# Altium schematic symbol library JLC.SchLib: 10 symbols
Pins are listed as number, name and electrical type; pins without a type are passive.

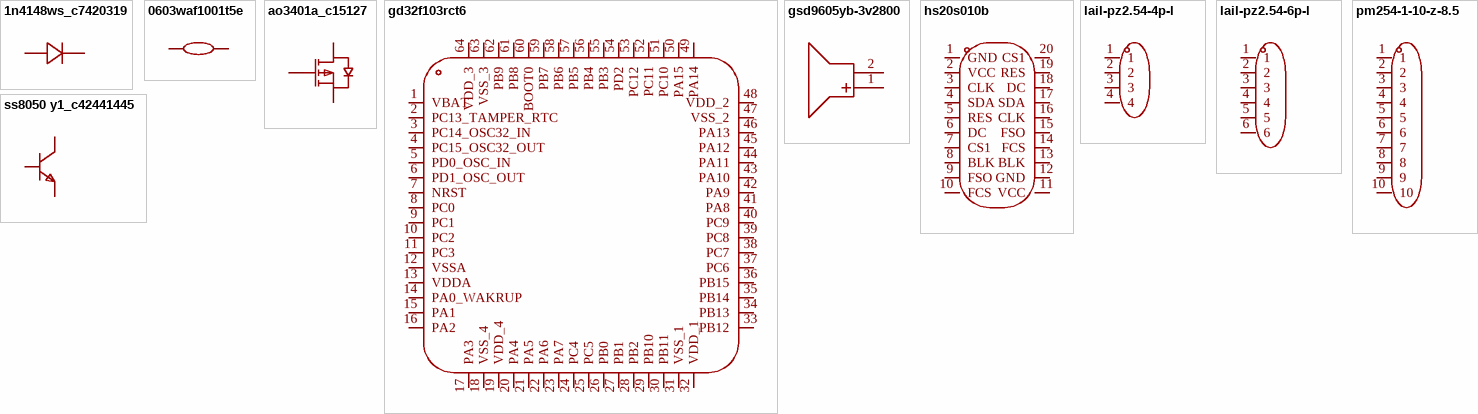
[diagram p0: symbols 1n4148ws_c7420319 to ss8050 y1_c42441445]

## 1n4148ws_c7420319
designator D??  (value not drawn)
二极管配置:独立式;整流电流:150mA;直流反向耐压(Vr):100V;正向压降(Vf):1.25V@150mA;反向恢复时间(Trr):4ns;; Manufacturer: R+O(宏嘉诚); AddInBom: yes; ModelId: 0f2f330c645944df9245ac3c3fec3456; ModelName: SOD-323_L1.7-W1.3-LS2.5-FD; ModelTransform: 98.425,49.2125,0,180,0,0,0,0,0; Diode Configuration: 独立式; Pd - Power Dissipation: 200mW; Current - Rectified: 150mA; Voltage - DC Reverse(Vr): 100V; Non-Repetitive Peak Forward Surge Current: 2A; Reverse Leakage Current (Ir): 1uA@75V; Reverse Recovery Time (trr): 4ns; Operating Junction Temperature Range: -55℃~+150℃; Symbol: 1N4148WS_C7420319; LCSC Part Name: 100V 150mA; SupplierPart: C7420319; ManufacturerPart: 1N4148WS; Supplier Footprint: SOD-323; JLCPCB Part Class: Extended Part; Datasheet: https://item.szlcsc.com/datasheet/1N4148WS/8397141.html; Supplier: LCSC; ConvertToPcb: yes; FootprintName: SOD-323_L1.7-W1.3-LS2.5-FD; Voltage - Forward(Vf@If): 1.25V@150mA
footprint SOD-323_L1.7-W1.3-LS2.5-FD
pins: 1 A, 2 K

## 0603waf1001t5e
designator R??  (value not drawn)
电阻类型:厚膜电阻;阻值:1kΩ;精度:±1%;功率:100mW;工作电压:75V;温度系数:±100ppm/℃;; Manufacturer: UNI-ROYAL(厚声); AddInBom: yes; ModelId: fc143cca1e79419f9cd78b61e9279f08; ModelName: R0603; ModelTransform: 31.8897,63.7794,0,90,0,0,0,0,0; Value: 1kΩ; Tolerance: ±1%; Power(Watts): 100mW; Voltage-Supply(Max): 75V; Symbol: 0603WAF1001T5E; LCSC Part Name: 1kΩ ±1% 100mW 厚膜电阻; SupplierPart: C21190; ManufacturerPart: 0603WAF1001T5E; Supplier Footprint: 0603; JLCPCB Part Class: Basic Part; Datasheet: https://item.szlcsc.com/datasheet/0603WAF1001T5E/21904.html; Supplier: LCSC; ConvertToPcb: yes; FootprintName: R0603; Type: 厚膜电阻; Temperature Coefficient: ±100ppm/℃; Operating Temperature: -55℃~+155℃
footprint R0603
pins: 1, 2

## ao3401a_c15127
designator Q??  (value not drawn)
数量:1个P沟道;漏源电压(Vdss):30V;连续漏极电流(Id):4A;导通电阻(RDS(on)):47mΩ@10V；85mΩ@2.5V；60mΩ@4.5V;耗散功率(Pd):-;阈值电压(Vgs(th)):900mV;; Manufacturer: AOS; AddInBom: yes; ModelId: c62791f0466c4ae2a892c056b845b0ca; ModelName: SOT-23-3P_L2.9-W1.3-H1.0-LS2.4-P0.95; ModelTransform: 98.64468,114.173,0,180,0,0,0.001,-0.002,0; Number: 1个P沟道; Drain to Source Voltage: 30V; Current - Continuous Drain(Id): 4A; Gate Threshold Voltage (Vgs(th)): 900mV; Gate Charge(Qg): 14nC@10V; Input Capacitance(Ciss): 645pF; Reverse Transfer Capacitance (Crss@Vds): 55pF; Output Capacitance(Coss): 80pF; Symbol: AO3401A; LCSC Part Name: 1个P沟道 耐压:30V 电流:4A; SupplierPart: C15127; ManufacturerPart: AO3401A; Supplier Footprint: SOT-23; JLCPCB Part Class: Basic Part; Datasheet: https://item.szlcsc.com/datasheet/AO3401A/15801.html; Supplier: LCSC; ConvertToPcb: yes; FootprintName: SOT-23_L2.9-W1.3-P1.90-LS2.4-BR; RDS(on): 47mΩ@10V；85mΩ@2.5V；60mΩ@4.5V; Pd - Power Dissipation: -; Operating Temperature: -; Type: -
footprint SOT-23_L2.9-W1.3-P1.90-LS2.4-BR
pins: 1 G, 2 S, 3 D

## gd32f103rct6
designator U??  (value not drawn)
CPU内核:ARM Cortex-M3;CPU最大主频:108MHz;CPU位数:32 Bit;; Manufacturer: GigaDevice(兆易创新); AddInBom: yes; ModelId: cd9de06618c44fcf82654c43a457f83c; ModelName: LQFP-64_L10.0-W10.0-H1.4-LS12.0-P0.50; ModelTransform: 472.441,472.441,0,0,0,0,0,0.465,0; CPU Maximum Speed: 108MHz; Core Size: 32 Bit; Program Storage Size: 256KB; Program Memory Type: FLASH; RAM Size: 48KB; Number of I/O: 51; ADC (Bit): 12bit; Oscillator Type: 内置+外置; Voltage - Supply: 2.6V~3.6V; Symbol: GD32F103RCT6; LCSC Part Name: Arm® Cortex®-M3 32-bit MCU; SupplierPart: C80687; ManufacturerPart: GD32F103RCT6; Supplier Footprint: LQFP-64(10x10); JLCPCB Part Class: Extended Part; Datasheet: https://item.szlcsc.com/datasheet/GD32F103RCT6/81837.html; Supplier: LCSC; ConvertToPcb: yes; FootprintName: LQFP-64_L10.0-W10.0-P0.50-LS12.0-BL; CPU Core: ARM Cortex-M3; EEPROM: -; DAC (Bit): 12bit; Operating Temperature: -40℃~+85℃; Features: 日历功能；内置通用定时器；外部管脚复位(NRST)
footprint LQFP-64_L10.0-W10.0-P0.50-LS12.0-BL
pins: 1 VBAT, 2 PC13_TAMPER_RTC, 3 PC14_OSC32_IN, 4 PC15_OSC32_OUT, 5 PD0_OSC_IN, 6 PD1_OSC_OUT, 7 NRST, 8 PC0, 9 PC1, 10 PC2, 11 PC3, 12 VSSA, 13 VDDA, 14 PA0_WAKRUP, 15 PA1, 16 PA2, 17 PA3, 18 VSS_4, 19 VDD_4, 20 PA4, 21 PA5, 22 PA6, 23 PA7, 24 PC4, 25 PC5, 26 PB0, 27 PB1, 28 PB2, 29 PB10, 30 PB11, 31 VSS_1, 32 VDD_1, 33 PB12, 34 PB13, 35 PB14, 36 PB15, 37 PC6, 38 PC7, 39 PC8, 40 PC9, 41 PA8, 42 PA9, 43 PA10, 44 PA11, 45 PA12, 46 PA13, 47 VSS_2, 48 VDD_2, 49 PA14, 50 PA15, 51 PC10, 52 PC11, 53 PC12, 54 PD2, 55 PB3, 56 PB4, 57 PB5, 58 PB6, 59 PB7, 60 BOOT0, 61 PB8, 62 PB9, 63 VSS_3, 64 VDD_3

## gsd9605yb-3v2800
designator BUZZER??  (value not drawn)
驱动方式:有源(内含驱动线路);构造类型:电磁式;额定电压:3.3V;频率:2.7kHz;声压(SPL):80dB;; Manufacturer: INGHAi(赢海); AddInBom: yes; ModelId: d9f071f9511e4f7795b1f85db8085480; ModelName: BUZ-SMD_L9.6-W9.6-H5.0; ModelTransform: 393.7,377.952,0,270,0,0,0,0,0; Voltage Rating: 3.3V; Voltage - Supply: 2V~5V; Value: 2.7kHz; Current Consumption: 30mA; Sound Pressure Level(SPL): 80dB; Symbol: GSD9605YB-3V2800; LCSC Part Name: 9.6*9.6*5mm电磁有源 3V; SupplierPart: C255327; ManufacturerPart: GSD9605YB-3V2800; Supplier Footprint: SMD,9.6x9.6mm; JLCPCB Part Class: Extended Part; Datasheet: https://item.szlcsc.com/datasheet/GSD9605YB-3V2800/249279.html; Supplier: LCSC; ConvertToPcb: yes; FootprintName: BUZ-SMD_GSD9605YB-3V2800; Driver Circuitry: 有源(内含驱动线路); Technology: 电磁式; Diameter(φD): -; Length: 9.6mm; Width: 9.6mm; Height: 5.2mm; Operating Temperature: -20℃~+70℃; Mounting Type: 贴片; Lead Pitch: -; Continuous Operating Time: -
footprint BUZ-SMD_GSD9605YB-3V2800
pins: 1 +, 2 -

## hs20s010b
designator LCD??  (value not drawn)
核心芯片:ST7789;尺寸(inch):2;像素分辨率:320x240;; Manufacturer: HS(汉昇); AddInBom: yes; ModelId: 0121547e629f428887221e14eec3ec9e; ModelName: LCD-TH_HS20S010B; ModelTransform: 1425.194,2488.18384,0,0,0,0,0,0,0; Controller Type: ST7789; Symbol: HS20S010B; LCSC Part Name: 2.0寸240*320(RGB)彩色SPI串口TFT液晶显示屏; SupplierPart: C5329586; ManufacturerPart: HS20S010B; Supplier Footprint: -; JLCPCB Part Class: Extended Part; Datasheet: https://item.szlcsc.com/datasheet/HS20S010B/6087847.html; Supplier: LCSC; ConvertToPcb: yes; FootprintName: LCD-TH_HS20S010B; Size: 2; Dot Pixels: 320x240; Operating Temperature: -20℃~+70℃
footprint LCD-TH_HS20S010B
pins: 1 GND, 2 VCC, 3 CLK, 4 SDA, 5 RES, 6 DC, 7 CS1, 8 BLK, 9 FSO, 10 FCS, 11 VCC, 12 GND, 13 BLK, 14 FCS, 15 FSO, 16 CLK, 17 SDA, 18 DC, 19 RES, 20 CS1

## lail-pz2.54-4p-l
designator H??  (value not drawn)
插针结构:1x4P;间距:2.54mm;圆针/方针:方针;安装方式:直插;排数:单排;总PIN位数:4P;额定电流:3A;额定电压:250V;配合针长度:6mm;塑高:2.5mm;端接针长度:3mm;触头材质:黄铜;触头镀层:金;工作温度:-25℃~+80℃;颜色:黑色;; Manufacturer: LAILAN(莱联); AddInBom: yes; ModelId: 112b012cb4004446aa5386c9c86d05f0; ModelName: CONN-TH_LAIL-PZ2.54-4P-L; ModelTransform: 400.039,100,0,0,0,0,0,0,-118.11; Pin Structure: 1x4P; Pitch: 2.54mm; Circluar Pins/Square Pins: 方针; Current Rating: 3A; Voltage Rating (Max): 250V; LCSC Part Name: 1x4P 间距:2.54mm 方针 直插; SupplierPart: C54950602; ManufacturerPart: LAIL-PZ2.54-4P-L; Supplier Footprint: 插件,P=2.54mm; JLCPCB Part Class: Extended Part; Datasheet: https://item.szlcsc.com/datasheet/LAIL-PZ2.54-4P-L/58519955.html; Supplier: LCSC; ConvertToPcb: yes; SymbolName: LAIL-PZ2.54-4P-L; FootprintName: CONN-TH_LAIL-PZ2.54-4P-L; Mounting Type: 直插; Number of Rows: 单排; Number of Pins: 4P; Length of Mating Pin: 6mm; Insulation Height: 2.5mm; Length of End Connection Pin: 3mm; Contact Material: 黄铜; Contact Plating: 金; Operating Temperature: -25℃~+80℃; Color: 黑色
footprint CONN-TH_LAIL-PZ2.54-4P-L
pins: 1, 2, 3, 4

## lail-pz2.54-6p-l
designator H??  (value not drawn)
插针结构:1x6P;间距:2.54mm;圆针/方针:方针;安装方式:直插;排数:单排;总PIN位数:6P;额定电流:3A;额定电压:250V;配合针长度:6mm;塑高:2.5mm;端接针长度:3mm;触头材质:黄铜;触头镀层:金;工作温度:-25℃~+80℃;颜色:黑色;; Manufacturer: LAILAN(莱联); AddInBom: yes; ModelId: 78d66b34ad7c4f8faa1ccf54151694d8; ModelName: CONN-TH_LAIL-PZ2.54-6P-L; ModelTransform: 599.999,98.8187,0,0,0,0,0,0,-118.11; Pin Structure: 1x6P; Pitch: 2.54mm; Circluar Pins/Square Pins: 方针; Current Rating: 3A; Voltage Rating (Max): 250V; LCSC Part Name: 1x6P 间距:2.54mm 方针 直插; SupplierPart: C54950607; ManufacturerPart: LAIL-PZ2.54-6P-L; Supplier Footprint: 插件,P=2.54mm; JLCPCB Part Class: Extended Part; Datasheet: https://item.szlcsc.com/datasheet/LAIL-PZ2.54-6P-L/58519960.html; Supplier: LCSC; ConvertToPcb: yes; SymbolName: LAIL-PZ2.54-6P-L; FootprintName: CONN-TH_LAIL-PZ2.54-6P-L; Mounting Type: 直插; Number of Rows: 单排; Number of Pins: 6P; Length of Mating Pin: 6mm; Insulation Height: 2.5mm; Length of End Connection Pin: 3mm; Contact Material: 黄铜; Contact Plating: 金; Operating Temperature: -25℃~+80℃; Color: 黑色
footprint CONN-TH_LAIL-PZ2.54-6P-L
pins: 1, 2, 3, 4, 5, 6

## pm254-1-10-z-8.5
designator U??  (value not drawn)
插孔结构:1x10P;间距:2.54mm;行距:-;圆孔/方孔:方孔;安装方式:直插;排数:单排;总孔位数:10P;额定电流:3A;额定电压:-;插孔方向:顶部;塑高:8.5mm;触头材质:铜合金;工作温度:-40℃~+105℃;; Manufacturer: HCTL(华灿天禄); AddInBom: yes; ModelId: 08a5ee31ec6747838a696d2ac093ffa4; ModelName: HDR-TH_10P-P2.54-F-LI-1X10P; ModelTransform: 1009.87987,100,0,0,0,0,0,0,-125.984; Holes Structure: 1x10P; Pitch: 2.54mm; Circular Hole / Square Hole: 方孔; Number of Positions: 10P; Current Rating: 3A; Holes Direction: 顶部; PIN Length: 3.2mm; Symbol: PM254-1-10-Z-8.5; LCSC Part Name: 1x10P 间距:2.54mm 直插; SupplierPart: C2897373; ManufacturerPart: PM254-1-10-Z-8.5; Supplier Footprint: 插件,P=2.54mm; JLCPCB Part Class: Extended Part; Datasheet: https://item.szlcsc.com/datasheet/PM254-1-10-Z-8.5/3142378.html; Supplier: LCSC; ConvertToPcb: yes; FootprintName: HDR-TH_10P-P2.54-V-F; Row Spacing: -; Mounting Type: 直插; Number of Rows: 单排; Voltage Rating (Max): -; Insulation Height: 8.5mm; Contact Material: 铜合金; Operating Temperature: -40℃~+105℃
footprint HDR-TH_10P-P2.54-V-F
pins: 1, 2, 3, 4, 5, 6, 7, 8, 9, 10

## ss8050 y1_c42441445
designator Q??  (value not drawn)
晶体管类型:NPN;集电极电流(Ic):1.5A;集射极击穿电压(Vceo):25V;耗散功率(Pd):300mW;直流电流增益(hFE):400;; Manufacturer: TDSEMIC(拓电半导体); AddInBom: yes; ModelId: d6da7d402cef4f10869fb4f7686eaa0f; ModelName: SOT-23-3_L2.9-W1.5-P2.0-LS2.5-BR; ModelTransform: 102.362,114.173,0,0,0,0,-0.001,0.002,0; type: NPN; Current - Collector(Ic): 1.5A; Collector - Emitter Voltage VCEO: 25V; Pd - Power Dissipation: 300mW; DC Current Gain: 400; Transition frequency(fT): 100MHz; Current - Collector Cutoff: 100nA; Vce Saturation(VCE(sat)): 500mV; Emitter-Base Voltage(Vebo): 5V; Number: 1个NPN; Symbol: SS8050 Y1_C42441445; LCSC Part Name: NPN 电流:1.5A 电压:25V; SupplierPart: C42441445; ManufacturerPart: SS8050 Y1; Supplier Footprint: SOT-23; JLCPCB Part Class: Extended Part; Datasheet: https://item.szlcsc.com/datasheet/SS8050%2520Y1/44491119.html; Supplier: LCSC; ConvertToPcb: yes; FootprintName: SOT-23-3_L2.9-W1.5-P2.0-LS2.5-BR; Operating Temperature: -; Configuration: -
footprint SOT-23-3_L2.9-W1.5-P2.0-LS2.5-BR
pins: 1 B, 2 E, 3 C